# Altium integrated library BZX84C13-7-F.IntLib: 1 symbol
Pins are listed as number, name and electrical type; pins without a type are passive.

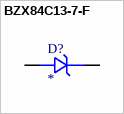
[diagram p0: symbol BZX84C13-7-F]

## BZX84C13-7-F
designator D?
Zener Diode 13 V 300 mW Â±6.54% Surface Mount SOT-23-3; MF: Diodes Inc.; MP: BZX84C13-7-F; SnapEDA_Link: https://www.snapeda.com/parts/BZX84C13-7-F/Diodes+Inc./view-part/?ref=snap; Package: SOT-23 Diodes Inc.; Value: *; Check_prices: https://www.snapeda.com/parts/BZX84C13-7-F/Diodes+Inc./view-part/?ref=eda
footprint SOT91P240X105-3N
pins: 1 ANODE, 3 CATHODE